# Altium footprint library SW_EVQ9P701P.PcbLib: 1 footprints
Each footprint in its own frame and in the unit in brackets; x right, y up, seen from the top. Pads: shape width x height; smd on the part's side, far side on the other; paste and mask are expansions set on the pad; w line width, h text height; cw(c..) or ccw(c..) is an arc to the next point about the centre after c.
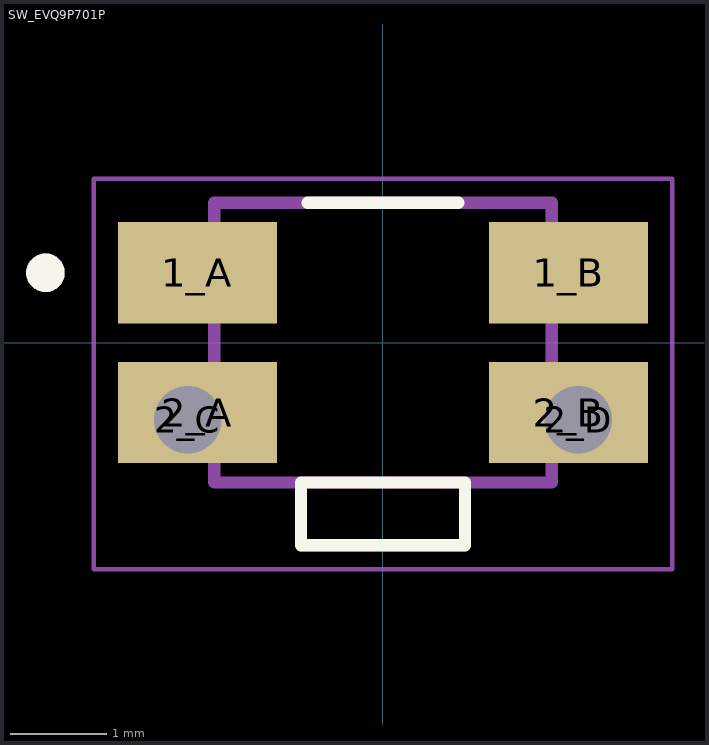
[diagram p0: the footprint, top view; thin cyan lines are the x and y axes]

## SW_EVQ9P701P [mm]
height 1.35
pads (6):
  rect 1.65x1.05 smd: 1_A(-1.925,0.725) 1_B(1.925,0.725) 2_A(-1.925,-0.725) 2_B(1.925,-0.725)
  round 0.9 hole 0.7 mask+0: 2_C(-2.025,-0.8) 2_D(2.025,-0.8)
Top Overlay:
  circle w0.2: c-3.5,0.725 r0.1
  lines w0.127: -0.78,1.45 0.78,1.45 ; -0.85,-2.1 -0.85,-1.45 0.85,-1.45 0.85,-2.1 -0.85,-2.1
Mechanical 13:
  circle w0.2: c-3.5,0.725 r0.1
  lines w0.127: -0.85,-1.45 -0.85,-2.1 0.85,-2.1 0.85,-1.45 ; -0.85,-1.45 0.85,-1.45 ; -0.85,-1.45 -1.75,-1.45 -1.75,1.45 1.75,1.45 1.75,-1.45 0.85,-1.45
Mechanical 15:
  lines w0.05: -3,-2.35 3,-2.35 3,1.7 -3,1.7 -3,-2.35
3D body "EVQ9P701P--3DModel-STEP-269445.STEP": height 1.35, standoff -0.6, extent -2.35,-2.1 2.35,1.45